# Altium schematic symbol library Speaker.SchLib: 4 symbols
Pins are listed as number, name and electrical type; pins without a type are passive.

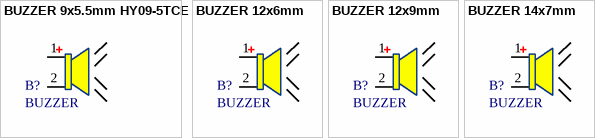
[diagram p0: symbols BUZZER 9x5.5mm HY09-5TCE to BUZZER 14x7mm]

## BUZZER 9x5.5mm HY09-5TCE
designator B?, comment BUZZER
BUZZER 5V 9x5.5mm, 60mA, Vin: 4-6V; Code: 3701-004; Designed by: Nhox
footprint BUZZER 9055 (9x5.5mm)
pins: 1, 2

## BUZZER 12x6mm
designator B?, comment BUZZER
BUZZER 5V 12x6mm; Code: 3701-003; Designed by: TranLuyen
footprint buzzer 12x6mm
pins: 1, 2

## BUZZER 12x9mm
designator B?, comment BUZZER
BUZZER 5V 12x9mm; Code: 3710-018; Designed by: TranLuyen
footprint buzzer 12x9mm
pins: 1, 2

## BUZZER 14x7mm
designator B?, comment BUZZER
BUZZER 5V 14x7mm; Code: N/A
footprint buzzer 14x7mm
pins: 1, 2